# Altium integrated library Altium_USB.IntLib: 46 symbols (part 2 of 2)
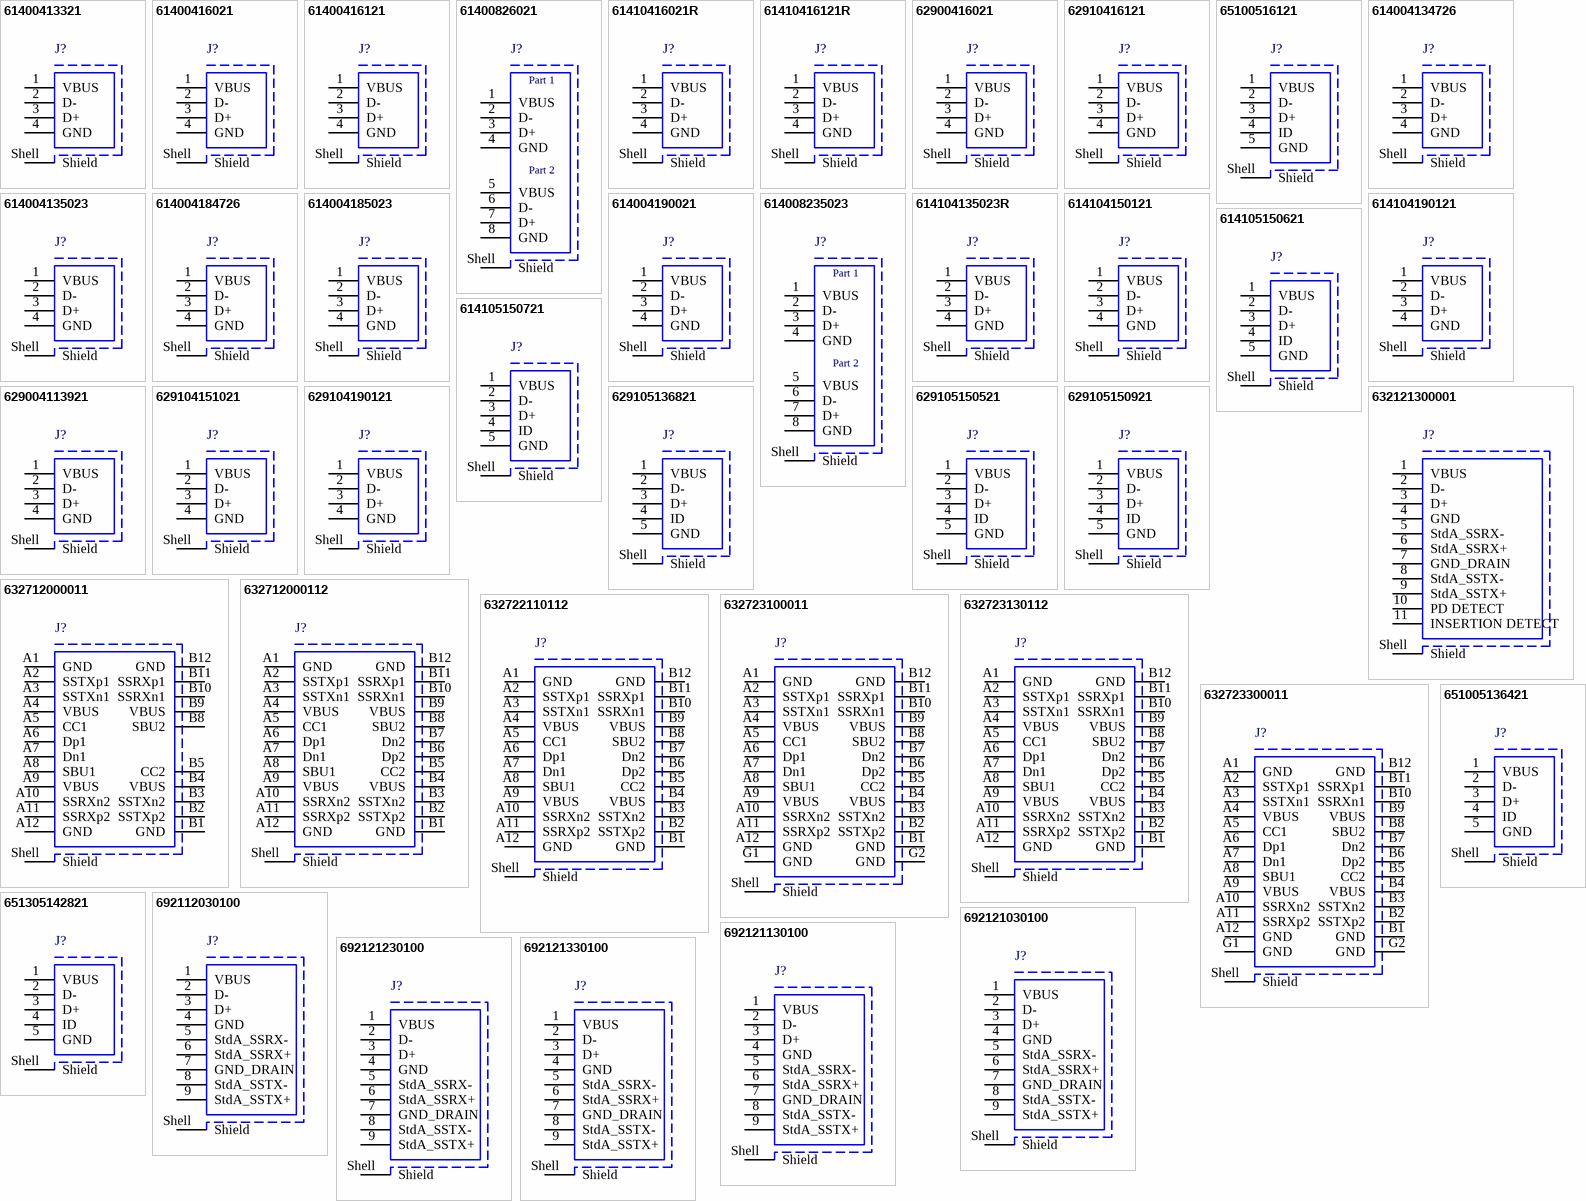
[diagram p2: symbols 61400413321 to 692121330100]

## 692121230100
designator J?
USB 3.0 Type A Receptacle WR-COM, Horizontal, THT, with Clips, with 1.04 mm Offset; Part Number: 692121230100; Rated Current: 0.25 A; Contact Resistance: 50 mOhm; Working Voltage: 30 VAC; Supply Name 1: Mouser; Supply SN 1: 710-692121230100; ComponentLink1Description: Manufacturer; ComponentLink1URL: http://www.we-online.de; ComponentLink2Description: Datasheet; ComponentLink2URL: https://katalog.we-online.de/em/datasheet/692121230100.pdf; Published Date: September 2018; Publisher: Wurth Elektronik; Orientation: Horizontal; Connector Type: USB 3.0 Type A; Operating Temperature: -20 to 85 degC; Mounting Technology: THT; Gender: Receptacle; Packaging: Tape and Reel; ComponentLink3Description: Global Supply; ComponentLink3URL: https://www.we-online.com/en/components/products/COM_3_0_TYPE_A_HORIZONTAL_W_OFFSET_1_04MM?sq=692121230100#692121230100; ComponentLink4Description: Global Supply; ComponentLink4URL: https://www.mouser.vn/ProductDetail/Wurth-Elektronik/692121230100?qs=e5m3IbTHPW%2FDHF4StRNH4g%3D%3D; Supply URL 1: https://www.mouser.vn/ProductDetail/Wurth-Elektronik/692121230100?qs=e5m3IbTHPW%2FDHF4StRNH4g%3D%3D
footprint 692121230100
pins: 1 VBUS, 2 D-, 3 D+, 4 GND, 5 StdA_SSRX-, 6 StdA_SSRX+, 7 GND_DRAIN, 8 StdA_SSTX-, 9 StdA_SSTX+, Shell Shield

## 692121330100
designator J?
USB 3.0 Type A Receptacle WR-COM, Reverse Horizontal, SMT / THT, with Clips, with 1.75 mm Offset; Part Number: 692121330100; Rated Current: 0.25 A; Contact Resistance: 50 mOhm; Working Voltage: 30 VAC; Supply Name 1: Mouser; Supply SN 1: 710-692121330100; ComponentLink1Description: Manufacturer; ComponentLink1URL: http://www.we-online.de; ComponentLink2Description: Datasheet; ComponentLink2URL: https://katalog.we-online.de/em/datasheet/692121330100.pdf; Published Date: September 2018; Publisher: Wurth Elektronik; Orientation: Reverse Horizontal; Connector Type: USB 3.0 Type A; Operating Temperature: -20 to 85 degC; Mounting Technology: SMT / THT; Gender: Receptacle; Packaging: Tape and Reel; ComponentLink3Description: Global Supply; ComponentLink3URL: https://www.we-online.com/en/components/products/COM_3_0_TYPE_A_REVERSE_HORIZONTAL_W_OFFSET_1_75MM?sq=692121330100#692121330100; ComponentLink4Description: Global Supply; ComponentLink4URL: https://www.mouser.vn/ProductDetail/Wurth-Elektronik/692121330100?qs=e5m3IbTHPW99Xr8Z17AOaA%3D%3D; Supply URL 1: https://www.mouser.vn/ProductDetail/Wurth-Elektronik/692121330100?qs=e5m3IbTHPW99Xr8Z17AOaA%3D%3D
footprint 692121330100
pins: 1 VBUS, 2 D-, 3 D+, 4 GND, 5 StdA_SSRX-, 6 StdA_SSRX+, 7 GND_DRAIN, 8 StdA_SSTX-, 9 StdA_SSTX+, Shell Shield

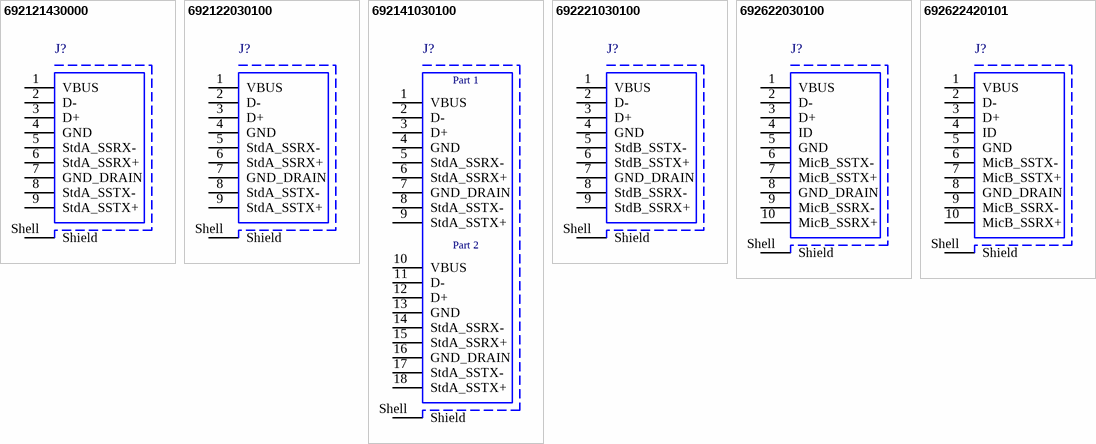
[diagram p1: symbols 692121430000 to 692622420101]

## 692121430000
designator J?
USB 3.0 Type A Receptacle WR-COM, Vertical, THT; Part Number: 692121430000; Rated Current: 0.25 A; Contact Resistance: 50 mOhm; Working Voltage: 30 VAC; Supply Name 1: Mouser; Supply SN 1: 710-692121430000; Supply Name 2: thegioiic; ComponentLink1Description: Manufacturer; ComponentLink1URL: http://www.we-online.de; ComponentLink2Description: Datasheet; ComponentLink2URL: https://katalog.we-online.de/em/datasheet/692121430000.pdf; Published Date: September 2018; Publisher: Wurth Elektronik; Orientation: Vertical; Connector Type: USB 3.0 Type A; Operating Temperature: -20 to 85 degC; Mounting Technology: THT; Gender: Receptacle; Packaging: Tray; ComponentLink3Description: Global Supply; ComponentLink3URL: https://www.we-online.com/en/components/products/COM_3_0_THT_TYPE_A_VERTICAL?sq=692121430000#692121430000; ComponentLink4Description: Global Supply; ComponentLink4URL: https://www.mouser.vn/ProductDetail/Wurth-Elektronik/692121430000?qs=rpZl0fJ%252B%2F%2F4t4glJEDfopg%3D%3D; ComponentLink5Description: Local Supply; ComponentLink5URL: https://www.thegioiic.com/cong-usb-cai-3-0-type-a-9-chan-thang-xuyen-lo; Supply URL 1: https://www.mouser.vn/ProductDetail/Wurth-Elektronik/692121430000?qs=rpZl0fJ%252B%2F%2F4t4glJEDfopg%3D%3D; Supply URL 2: https://www.thegioiic.com/cong-usb-cai-3-0-type-a-9-chan-thang-xuyen-lo
footprint 692121430000
pins: 1 VBUS, 2 D-, 3 D+, 4 GND, 5 StdA_SSRX-, 6 StdA_SSRX+, 7 GND_DRAIN, 8 StdA_SSTX-, 9 StdA_SSTX+, Shell Shield

## 692122030100
designator J?
USB 3.0 Type A Receptacle WR-COM, Horizontal, SMT, with Pegs; Part Number: 692122030100; Rated Current: 0.25 A; Contact Resistance: 50 mOhm; Working Voltage: 30 VAC; Supply Name 1: Mouser; Supply SN 1: 710-692122030100; ComponentLink1Description: Manufacturer; ComponentLink1URL: http://www.we-online.de; ComponentLink2Description: Datasheet; ComponentLink2URL: https://katalog.we-online.de/em/datasheet/692122030100.pdf; Published Date: September 2018; Publisher: Wurth Elektronik; Orientation: Horizontal; Connector Type: USB 3.0 Type A; Operating Temperature: -20 to 85 degC; Mounting Technology: SMT; Gender: Receptacle; Packaging: Tape and Reel; ComponentLink3Description: Global Supply; ComponentLink3URL: https://www.we-online.com/en/components/products/COM_3_0_SMT_TYPE_A_HORIZONTAL?sq=692122030100#692122030100; ComponentLink4Description: Global Supply; ComponentLink4URL: https://www.mouser.vn/ProductDetail/Wurth-Elektronik/692122030100?qs=e5m3IbTHPW%252BwkSEzX%252BzXuw%3D%3D; Supply URL 1: https://www.mouser.vn/ProductDetail/Wurth-Elektronik/692122030100?qs=e5m3IbTHPW%252BwkSEzX%252BzXuw%3D%3D
footprint 692122030100
pins: 1 VBUS, 2 D-, 3 D+, 4 GND, 5 StdA_SSRX-, 6 StdA_SSRX+, 7 GND_DRAIN, 8 StdA_SSTX-, 9 StdA_SSTX+, Shell Shield

## 692141030100
designator J?
USB 3.0 Type A Receptacle WR-COM, Stacked Horizontal, THT; Part Number: 692141030100; Rated Current: 0.25 A; Contact Resistance: 50 mOhm; Working Voltage: 30 VAC; Supply Name 1: Mouser; Supply SN 1: 710-692141030100; Supply Name 2: thegioiic; ComponentLink1Description: Manufacturer; ComponentLink1URL: http://www.we-online.de; ComponentLink2Description: Datasheet; ComponentLink2URL: https://katalog.we-online.de/em/datasheet/692141030100.pdf; Published Date: September 2018; Publisher: Wurth Elektronik; Orientation: Stacked Horizontal; Connector Type: USB 3.0 Type A; Operating Temperature: -40 to 85 degC; Mounting Technology: THT; Gender: Receptacle; Packaging: Tray; ComponentLink3Description: Global Supply; ComponentLink3URL: https://www.we-online.com/en/components/products/COM_3_0_TYPE_A_STACKED?sq=692141030100#692141030100; ComponentLink4Description: Global Supply; ComponentLink4URL: https://www.mouser.vn/ProductDetail/Wurth-Elektronik/692141030100?qs=e5m3IbTHPW%252BhJaDZDD1GNQ%3D%3D; ComponentLink5Description: Local Supply; ComponentLink5URL: https://www.thegioiic.com/cong-usb-cai-doi-3-0-type-a-18-chan-thang-han-pcb; Supply URL 1: https://www.mouser.vn/ProductDetail/Wurth-Elektronik/692141030100?qs=e5m3IbTHPW%252BhJaDZDD1GNQ%3D%3D; Supply URL 2: https://www.thegioiic.com/cong-usb-cai-doi-3-0-type-a-18-chan-thang-han-pcb
footprint 692141030100
pins: 1 VBUS, 2 D-, 3 D+, 4 GND, 5 StdA_SSRX-, 6 StdA_SSRX+, 7 GND_DRAIN, 8 StdA_SSTX-, 9 StdA_SSTX+, 10 VBUS, 11 D-, 12 D+, 13 GND, 14 StdA_SSRX-, 15 StdA_SSRX+, 16 GND_DRAIN, 17 StdA_SSTX-, 18 StdA_SSTX+, Shell Shield
text: Part 1; Part 2

## 692221030100
designator J?
USB 3.0 Type B Receptacle WR-COM, Horizontal, THT; Part Number: 692221030100; Rated Current: 0.25 A; Contact Resistance: 50 mOhm; Working Voltage: 30 VAC; Supply Name 1: Mouser; Supply SN 1: 710-692221030100; Supply Name 2: thegioiic; ComponentLink1Description: Manufacturer; ComponentLink1URL: http://www.we-online.de; ComponentLink2Description: Datasheet; ComponentLink2URL: https://katalog.we-online.de/em/datasheet/692221030100.pdf; Published Date: September 2018; Publisher: Wurth Elektronik; Orientation: Horizontal; Connector Type: USB 3.0 Type B; Operating Temperature: -20 to 85 degC; Mounting Technology: THT; Gender: Receptacle; Packaging: Tray; ComponentLink3Description: Global Supply; ComponentLink3URL: https://www.we-online.com/en/components/products/COM_3_0_TYPE_B_HORIZONTAL?sq=692221030100#692221030100; ComponentLink4Description: Global Supply; ComponentLink4URL: https://www.mouser.vn/ProductDetail/Wurth-Elektronik/692221030100?qs=e5m3IbTHPW%2F1T4qlB0JfxA%3D%3D; ComponentLink5Description: Local Supply; ComponentLink5URL: https://www.thegioiic.com/bf90-cong-usb-cai-3-0-type-b-9-chan-cong-90-do-xuyen-lo; Supply URL 1: https://www.mouser.vn/ProductDetail/Wurth-Elektronik/692221030100?qs=e5m3IbTHPW%2F1T4qlB0JfxA%3D%3D; Supply URL 2: https://www.thegioiic.com/bf90-cong-usb-cai-3-0-type-b-9-chan-cong-90-do-xuyen-lo
footprint 692221030100
pins: 1 VBUS, 2 D-, 3 D+, 4 GND, 5 StdB_SSTX-, 6 StdB_SSTX+, 7 GND_DRAIN, 8 StdB_SSRX-, 9 StdB_SSRX+, Shell Shield

## 692622030100
designator J?
Micro USB 3.0 Type B Receptacle WR-COM, Horizontal, SMT, with Pads; Part Number: 692622030100; Rated Current: 0.25 A; Contact Resistance: 50 mOhm; Working Voltage: 30 VAC; Supply Name 1: Mouser; Supply SN 1: 710-692622030100; ComponentLink1Description: Manufacturer; ComponentLink1URL: http://www.we-online.de; ComponentLink2Description: Datasheet; ComponentLink2URL: https://katalog.we-online.de/em/datasheet/692622030100.pdf; Published Date: September 2018; Publisher: Wurth Elektronik; Orientation: Horizontal; Connector Type: Micro USB 3.0 Type B; Operating Temperature: -20 to 85 degC; Mounting Technology: SMT; Gender: Receptacle; Packaging: Tape and Reel; ComponentLink3Description: Global Supply; ComponentLink3URL: https://www.we-online.com/en/components/products/COM_MICRO_3_0_SMT_TYPE_B_HORIZONTAL?sq=692622030100#692622030100; ComponentLink4Description: Global Supply; ComponentLink4URL: https://www.mouser.vn/ProductDetail/Wurth-Elektronik/692622030100?qs=e5m3IbTHPW96DxjuTwzqKQ%3D%3D; Supply URL 1: https://www.mouser.vn/ProductDetail/Wurth-Elektronik/692622030100?qs=e5m3IbTHPW96DxjuTwzqKQ%3D%3D
footprint 692622030100
pins: 1 VBUS, 2 D-, 3 D+, 4 ID, 5 GND, 6 MicB_SSTX-, 7 MicB_SSTX+, 8 GND_DRAIN, 9 MicB_SSRX-, 10 MicB_SSRX+, Shell Shield

## 692622420101
designator J?
Micro USB 3.0 Type B Receptacle WR-COM, Vertical, SMT, with Pads and Pegs; Part Number: 692622420101; Rated Current: 0.25 A; Contact Resistance: 30 mOhm; Working Voltage: 30 VAC; Supply Name 1: Mouser; Supply SN 1: 710-692622420101; ComponentLink1Description: Manufacturer; ComponentLink1URL: http://www.we-online.de; ComponentLink2Description: Datasheet; ComponentLink2URL: https://katalog.we-online.de/em/datasheet/692622420101.pdf; Published Date: September 2018; Publisher: Wurth Elektronik; Orientation: Vertical; Connector Type: Micro USB 3.0 Type B; Operating Temperature: -30 to 85 degC; Mounting Technology: SMT; Gender: Receptacle; Packaging: Tape and Reel; ComponentLink3Description: Global Supply; ComponentLink3URL: https://www.we-online.com/en/components/products/COM_MICRO_3_0_SMT_TYPE_B_VERTICAL?sq=692622420101#692622420101; ComponentLink4Description: Global Supply; ComponentLink4URL: https://www.mouser.vn/ProductDetail/Wurth-Elektronik/692622420101?qs=DvsTirrhYfOrDBBYKe6gCg%3D%3D; Supply URL 1: https://www.mouser.vn/ProductDetail/Wurth-Elektronik/692622420101?qs=DvsTirrhYfOrDBBYKe6gCg%3D%3D
footprint 692622420101
pins: 1 VBUS, 2 D-, 3 D+, 4 ID, 5 GND, 6 MicB_SSTX-, 7 MicB_SSTX+, 8 GND_DRAIN, 9 MicB_SSRX-, 10 MicB_SSRX+, Shell Shield